# Altium schematic symbol library MY_LIB_Connectors_IEC.SchLib: 136 symbols (part 1 of 3)
Pins are listed as number, name and electrical type; pins without a type are passive.

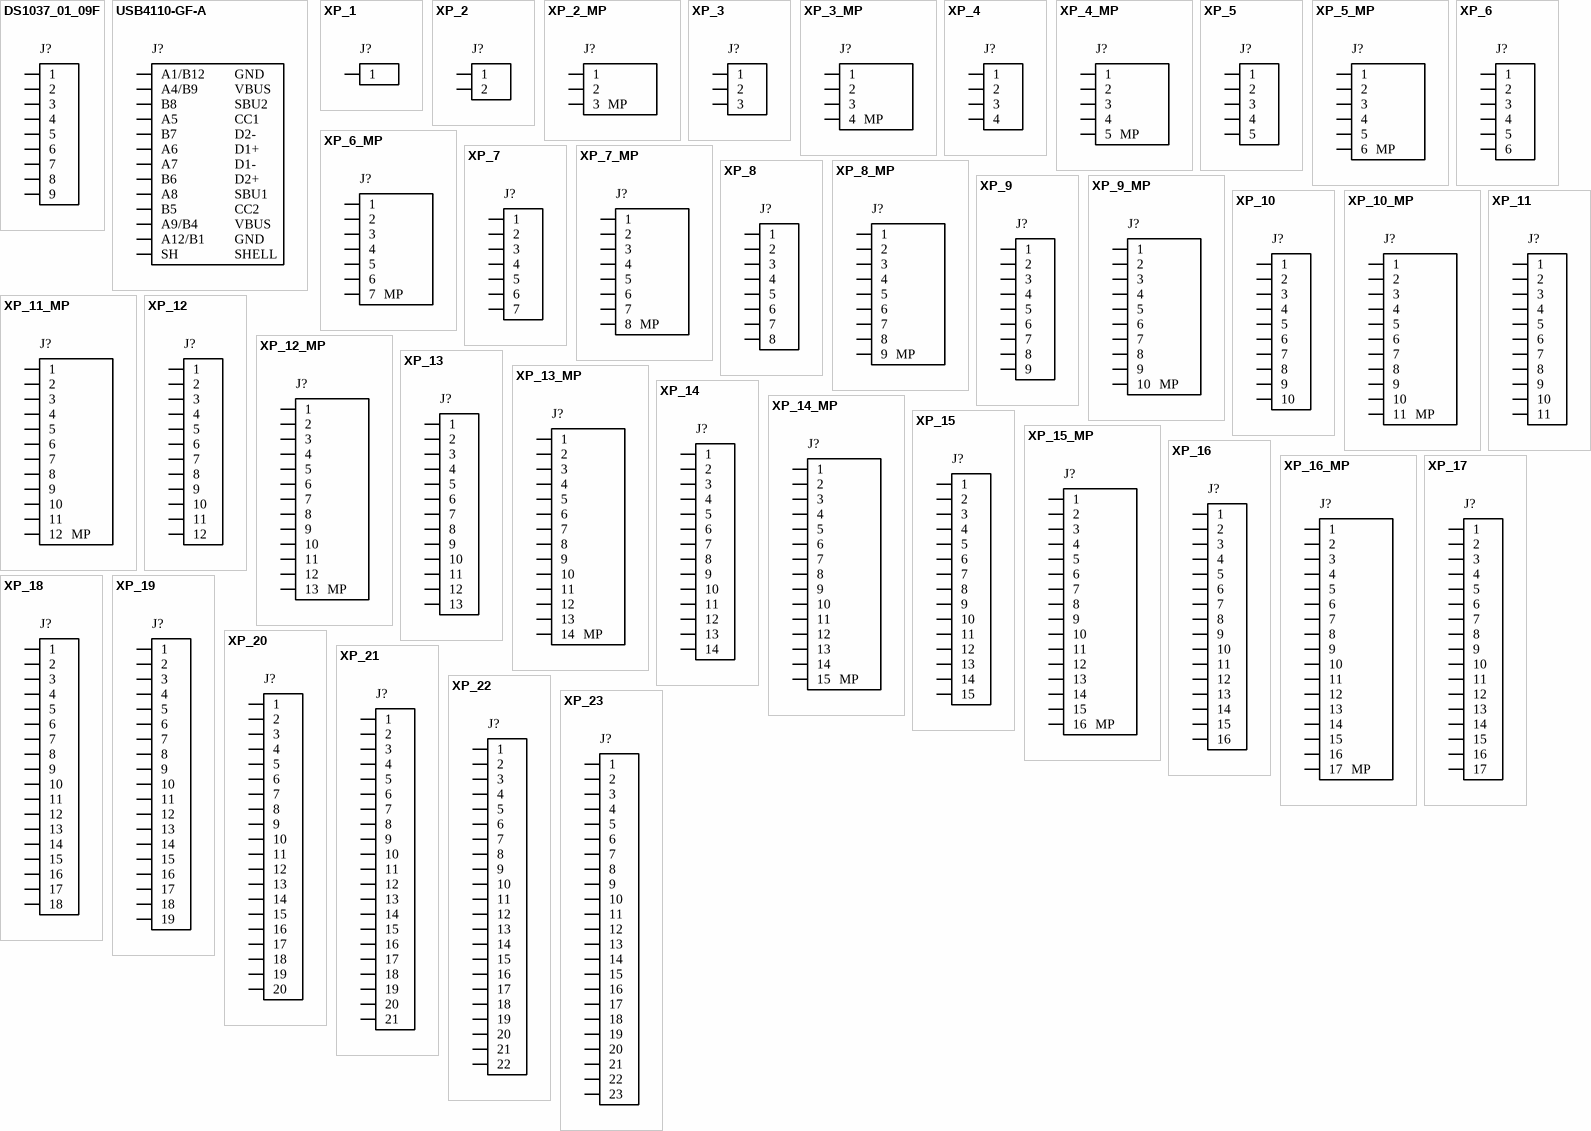
[diagram p0: symbols DS1037_01_09F to XP_23]

## DS1037_01_09F
designator J?  (value not drawn)
Generic 9-contact connector; editable signal names; Pin9_Name: Name; Value: *; Pin8_Name: Name; Pin7_Name: Name; Pin6_Name: Name; Pin5_Name: Name; Pin4_Name: Name; Pin3_Name: Name; Pin2_Name: Name; Pin1_Name: Name
pins: 1 Name, 2 Name, 3 Name, 4 Name, 5 Name, 6 Name, 7 Name, 8 Name, 9 Name

## USB4110-GF-A
designator J?  PinA1_B12_Name: GND  PinA4_B9_Name: VBUS  PinB8_Name: SBU2  PinA5_Name: CC1  PinB7_Name: D2-  PinA6_Name: D1+  PinA7_Name: D1-  PinB6_Name: D2+  PinA8_Name: SBU1  PinB5_Name: CC2  PinSH_Name: SHELL  (hidden comment: USB4110-GF-A)
GCT USB Type-C USB2.0 receptacle; 12 PCB signal terminals representing 16 mating contacts; common SH shell pin; Value: USB4110-GF-A; Manufacturer: GCT; MPN: USB4110-GF-A; Datasheet: https://gct.co/files/drawings/usb4110.pdf; PinA9_B4_Name: VBUS; PinA12_B1_Name: GND
pins: A1/B12 GND, A4/B9 VBUS, A5 CC1, A6 D+1, A7 D-1, A8 SBU1, A9/B4 VBUS, A12/B1 GND, B5 CC2, B6 D+2, B7 D-2, B8 SBU2, SH SHELL

## XP_1
designator J?  (value not drawn)
Generic 1-contact connector; editable signal names; Pin1_Name: Name; Value: *
pins: 1 Name

## XP_2
designator J?  (value not drawn)
Generic 2-contact connector; editable signal names; Pin2_Name: Name; Value: *; Pin1_Name: Name
pins: 1 Name, 2 Name

## XP_2_MP
designator J?  Pin3_Name: MP  (hidden comment: *)
2 signal contacts plus MP; plug connector; Pin2_Name: Name; Value: *; Pin1_Name: Name
pins: 1 Name, 2 Name, 3 MP

## XP_3
designator J?  (value not drawn)
Generic 3-contact connector; editable signal names; Pin3_Name: Name; Value: *; Pin2_Name: Name; Pin1_Name: Name
pins: 1 Name, 2 Name, 3 Name

## XP_3_MP
designator J?  Pin4_Name: MP  (hidden comment: *)
3 signal contacts plus MP; plug connector; Pin3_Name: Name; Value: *; Pin2_Name: Name; Pin1_Name: Name
pins: 1 Name, 2 Name, 3 Name, 4 MP

## XP_4
designator J?  (value not drawn)
Generic 4-contact connector; editable signal names; Pin4_Name: Name; Value: *; Pin3_Name: Name; Pin2_Name: Name; Pin1_Name: Name
pins: 1 Name, 2 Name, 3 Name, 4 Name

## XP_4_MP
designator J?  Pin5_Name: MP  (hidden comment: *)
4 signal contacts plus MP; plug connector; Pin4_Name: Name; Value: *; Pin3_Name: Name; Pin2_Name: Name; Pin1_Name: Name
pins: 1 Name, 2 Name, 3 Name, 4 Name, 5 MP

## XP_5
designator J?  (value not drawn)
Generic 5-contact connector; editable signal names; Pin5_Name: Name; Value: *; Pin4_Name: Name; Pin3_Name: Name; Pin2_Name: Name; Pin1_Name: Name
pins: 1 Name, 2 Name, 3 Name, 4 Name, 5 Name

## XP_5_MP
designator J?  Pin6_Name: MP  (hidden comment: *)
5 signal contacts plus MP; plug connector; Pin5_Name: Name; Value: *; Pin4_Name: Name; Pin3_Name: Name; Pin2_Name: Name; Pin1_Name: Name
pins: 1 Name, 2 Name, 3 Name, 4 Name, 5 Name, 6 MP

## XP_6
designator J?  (value not drawn)
Generic 6-contact connector; editable signal names; Pin6_Name: Name; Value: *; Pin5_Name: Name; Pin4_Name: Name; Pin3_Name: Name; Pin2_Name: Name; Pin1_Name: Name
pins: 1 Name, 2 Name, 3 Name, 4 Name, 5 Name, 6 Name

## XP_6_MP
designator J?  Pin7_Name: MP  (hidden comment: *)
6 signal contacts plus MP; plug connector; Pin6_Name: Name; Value: *; Pin5_Name: Name; Pin4_Name: Name; Pin3_Name: Name; Pin2_Name: Name; Pin1_Name: Name
pins: 1 Name, 2 Name, 3 Name, 4 Name, 5 Name, 6 Name, 7 MP

## XP_7
designator J?  (value not drawn)
Generic 7-contact connector; editable signal names; Pin7_Name: Name; Value: *; Pin6_Name: Name; Pin5_Name: Name; Pin4_Name: Name; Pin3_Name: Name; Pin2_Name: Name; Pin1_Name: Name
pins: 1 Name, 2 Name, 3 Name, 4 Name, 5 Name, 6 Name, 7 Name

## XP_7_MP
designator J?  Pin8_Name: MP  (hidden comment: *)
7 signal contacts plus MP; plug connector; Pin7_Name: Name; Value: *; Pin6_Name: Name; Pin5_Name: Name; Pin4_Name: Name; Pin3_Name: Name; Pin2_Name: Name; Pin1_Name: Name
pins: 1 Name, 2 Name, 3 Name, 4 Name, 5 Name, 6 Name, 7 Name, 8 MP

## XP_8
designator J?  (value not drawn)
Generic 8-contact connector; editable signal names; Pin8_Name: Name; Value: *; Pin7_Name: Name; Pin6_Name: Name; Pin5_Name: Name; Pin4_Name: Name; Pin3_Name: Name; Pin2_Name: Name; Pin1_Name: Name
pins: 1 Name, 2 Name, 3 Name, 4 Name, 5 Name, 6 Name, 7 Name, 8 Name

## XP_8_MP
designator J?  Pin9_Name: MP  (hidden comment: *)
8 signal contacts plus MP; plug connector; Pin8_Name: Name; Value: *; Pin7_Name: Name; Pin6_Name: Name; Pin5_Name: Name; Pin4_Name: Name; Pin3_Name: Name; Pin2_Name: Name; Pin1_Name: Name
pins: 1 Name, 2 Name, 3 Name, 4 Name, 5 Name, 6 Name, 7 Name, 8 Name, 9 MP

## XP_9
designator J?  (value not drawn)
Generic 9-contact connector; editable signal names; Pin9_Name: Name; Value: *; Pin8_Name: Name; Pin7_Name: Name; Pin6_Name: Name; Pin5_Name: Name; Pin4_Name: Name; Pin3_Name: Name; Pin2_Name: Name; Pin1_Name: Name
pins: 1 Name, 2 Name, 3 Name, 4 Name, 5 Name, 6 Name, 7 Name, 8 Name, 9 Name

## XP_9_MP
designator J?  Pin10_Name: MP  (hidden comment: *)
9 signal contacts plus MP; plug connector; Pin9_Name: Name; Value: *; Pin8_Name: Name; Pin7_Name: Name; Pin6_Name: Name; Pin5_Name: Name; Pin4_Name: Name; Pin3_Name: Name; Pin2_Name: Name; Pin1_Name: Name
pins: 1 Name, 2 Name, 3 Name, 4 Name, 5 Name, 6 Name, 7 Name, 8 Name, 9 Name, 10 MP

## XP_10
designator J?  (value not drawn)
Generic 10-contact connector; editable signal names; Pin10_Name: Name; Value: *; Pin9_Name: Name; Pin8_Name: Name; Pin7_Name: Name; Pin6_Name: Name; Pin5_Name: Name; Pin4_Name: Name; Pin3_Name: Name; Pin2_Name: Name; Pin1_Name: Name
pins: 1 Name, 2 Name, 3 Name, 4 Name, 5 Name, 6 Name, 7 Name, 8 Name, 9 Name, 10 Name

## XP_10_MP
designator J?  Pin11_Name: MP  (hidden comment: *)
10 signal contacts plus MP; plug connector; Pin10_Name: Name; Value: *; Pin9_Name: Name; Pin8_Name: Name; Pin7_Name: Name; Pin6_Name: Name; Pin5_Name: Name; Pin4_Name: Name; Pin3_Name: Name; Pin2_Name: Name; Pin1_Name: Name
pins: 1 Name, 2 Name, 3 Name, 4 Name, 5 Name, 6 Name, 7 Name, 8 Name, 9 Name, 10 Name, 11 MP

## XP_11
designator J?  (value not drawn)
Generic 11-contact connector; editable signal names; Pin11_Name: Name; Value: *; Pin10_Name: Name; Pin9_Name: Name; Pin8_Name: Name; Pin7_Name: Name; Pin6_Name: Name; Pin5_Name: Name; Pin4_Name: Name; Pin3_Name: Name; Pin2_Name: Name; Pin1_Name: Name
pins: 1 Name, 2 Name, 3 Name, 4 Name, 5 Name, 6 Name, 7 Name, 8 Name, 9 Name, 10 Name, 11 Name

## XP_11_MP
designator J?  Pin12_Name: MP  (hidden comment: *)
11 signal contacts plus MP; plug connector; Pin11_Name: Name; Value: *; Pin10_Name: Name; Pin9_Name: Name; Pin8_Name: Name; Pin7_Name: Name; Pin6_Name: Name; Pin5_Name: Name; Pin4_Name: Name; Pin3_Name: Name; Pin2_Name: Name; Pin1_Name: Name
pins: 1 Name, 2 Name, 3 Name, 4 Name, 5 Name, 6 Name, 7 Name, 8 Name, 9 Name, 10 Name, 11 Name, 12 MP

## XP_12
designator J?  (value not drawn)
Generic 12-contact connector; editable signal names; Pin12_Name: Name; Value: *; Pin11_Name: Name; Pin10_Name: Name; Pin9_Name: Name; Pin8_Name: Name; Pin7_Name: Name; Pin6_Name: Name; Pin5_Name: Name; Pin4_Name: Name; Pin3_Name: Name; Pin2_Name: Name; Pin1_Name: Name
pins: 1 Name, 2 Name, 3 Name, 4 Name, 5 Name, 6 Name, 7 Name, 8 Name, 9 Name, 10 Name, 11 Name, 12 Name

## XP_12_MP
designator J?  Pin13_Name: MP  (hidden comment: *)
12 signal contacts plus MP; plug connector; Pin12_Name: Name; Value: *; Pin11_Name: Name; Pin10_Name: Name; Pin9_Name: Name; Pin8_Name: Name; Pin7_Name: Name; Pin6_Name: Name; Pin5_Name: Name; Pin4_Name: Name; Pin3_Name: Name; Pin2_Name: Name; Pin1_Name: Name
pins: 1 Name, 2 Name, 3 Name, 4 Name, 5 Name, 6 Name, 7 Name, 8 Name, 9 Name, 10 Name, 11 Name, 12 Name, 13 MP

## XP_13
designator J?  (value not drawn)
Generic 13-contact connector; editable signal names; Pin13_Name: Name; Value: *; Pin12_Name: Name; Pin11_Name: Name; Pin10_Name: Name; Pin9_Name: Name; Pin8_Name: Name; Pin7_Name: Name; Pin6_Name: Name; Pin5_Name: Name; Pin4_Name: Name; Pin3_Name: Name; Pin2_Name: Name; Pin1_Name: Name
pins: 1 Name, 2 Name, 3 Name, 4 Name, 5 Name, 6 Name, 7 Name, 8 Name, 9 Name, 10 Name, 11 Name, 12 Name, 13 Name

## XP_13_MP
designator J?  Pin14_Name: MP  (hidden comment: *)
13 signal contacts plus MP; plug connector; Pin13_Name: Name; Value: *; Pin12_Name: Name; Pin11_Name: Name; Pin10_Name: Name; Pin9_Name: Name; Pin8_Name: Name; Pin7_Name: Name; Pin6_Name: Name; Pin5_Name: Name; Pin4_Name: Name; Pin3_Name: Name; Pin2_Name: Name; Pin1_Name: Name
pins: 1 Name, 2 Name, 3 Name, 4 Name, 5 Name, 6 Name, 7 Name, 8 Name, 9 Name, 10 Name, 11 Name, 12 Name, 13 Name, 14 MP

## XP_14
designator J?  (value not drawn)
Generic 14-contact connector; editable signal names; Pin14_Name: Name; Value: *; Pin13_Name: Name; Pin12_Name: Name; Pin11_Name: Name; Pin10_Name: Name; Pin9_Name: Name; Pin8_Name: Name; Pin7_Name: Name; Pin6_Name: Name; Pin5_Name: Name; Pin4_Name: Name; Pin3_Name: Name; Pin2_Name: Name; Pin1_Name: Name
pins: 1 Name, 2 Name, 3 Name, 4 Name, 5 Name, 6 Name, 7 Name, 8 Name, 9 Name, 10 Name, 11 Name, 12 Name, 13 Name, 14 Name

## XP_14_MP
designator J?  Pin15_Name: MP  (hidden comment: *)
14 signal contacts plus MP; plug connector; Pin14_Name: Name; Value: *; Pin13_Name: Name; Pin12_Name: Name; Pin11_Name: Name; Pin10_Name: Name; Pin9_Name: Name; Pin8_Name: Name; Pin7_Name: Name; Pin6_Name: Name; Pin5_Name: Name; Pin4_Name: Name; Pin3_Name: Name; Pin2_Name: Name; Pin1_Name: Name
pins: 1 Name, 2 Name, 3 Name, 4 Name, 5 Name, 6 Name, 7 Name, 8 Name, 9 Name, 10 Name, 11 Name, 12 Name, 13 Name, 14 Name, 15 MP

## XP_15
designator J?  (value not drawn)
Generic 15-contact connector; editable signal names; Pin15_Name: Name; Value: *; Pin14_Name: Name; Pin13_Name: Name; Pin12_Name: Name; Pin11_Name: Name; Pin10_Name: Name; Pin9_Name: Name; Pin8_Name: Name; Pin7_Name: Name; Pin6_Name: Name; Pin5_Name: Name; Pin4_Name: Name; Pin3_Name: Name; Pin2_Name: Name; Pin1_Name: Name
pins: 1 Name, 2 Name, 3 Name, 4 Name, 5 Name, 6 Name, 7 Name, 8 Name, 9 Name, 10 Name, 11 Name, 12 Name, 13 Name, 14 Name, 15 Name

## XP_15_MP
designator J?  Pin16_Name: MP  (hidden comment: *)
15 signal contacts plus MP; plug connector; Pin15_Name: Name; Value: *; Pin14_Name: Name; Pin13_Name: Name; Pin12_Name: Name; Pin11_Name: Name; Pin10_Name: Name; Pin9_Name: Name; Pin8_Name: Name; Pin7_Name: Name; Pin6_Name: Name; Pin5_Name: Name; Pin4_Name: Name; Pin3_Name: Name; Pin2_Name: Name; Pin1_Name: Name
pins: 1 Name, 2 Name, 3 Name, 4 Name, 5 Name, 6 Name, 7 Name, 8 Name, 9 Name, 10 Name, 11 Name, 12 Name, 13 Name, 14 Name, 15 Name, 16 MP

## XP_16
designator J?  (value not drawn)
Generic 16-contact connector; editable signal names; Pin16_Name: Name; Value: *; Pin15_Name: Name; Pin14_Name: Name; Pin13_Name: Name; Pin12_Name: Name; Pin11_Name: Name; Pin10_Name: Name; Pin9_Name: Name; Pin8_Name: Name; Pin7_Name: Name; Pin6_Name: Name; Pin5_Name: Name; Pin4_Name: Name; Pin3_Name: Name; Pin2_Name: Name; Pin1_Name: Name
pins: 1 Name, 2 Name, 3 Name, 4 Name, 5 Name, 6 Name, 7 Name, 8 Name, 9 Name, 10 Name, 11 Name, 12 Name, 13 Name, 14 Name, 15 Name, 16 Name

## XP_16_MP
designator J?  Pin17_Name: MP  (hidden comment: *)
16 signal contacts plus MP; plug connector; Pin16_Name: Name; Value: *; Pin15_Name: Name; Pin14_Name: Name; Pin13_Name: Name; Pin12_Name: Name; Pin11_Name: Name; Pin10_Name: Name; Pin9_Name: Name; Pin8_Name: Name; Pin7_Name: Name; Pin6_Name: Name; Pin5_Name: Name; Pin4_Name: Name; Pin3_Name: Name; Pin2_Name: Name; Pin1_Name: Name
pins: 1 Name, 2 Name, 3 Name, 4 Name, 5 Name, 6 Name, 7 Name, 8 Name, 9 Name, 10 Name, 11 Name, 12 Name, 13 Name, 14 Name, 15 Name, 16 Name, 17 MP

## XP_17
designator J?  (value not drawn)
Generic 17-contact connector; editable signal names; Pin17_Name: Name; Value: *; Pin16_Name: Name; Pin15_Name: Name; Pin14_Name: Name; Pin13_Name: Name; Pin12_Name: Name; Pin11_Name: Name; Pin10_Name: Name; Pin9_Name: Name; Pin8_Name: Name; Pin7_Name: Name; Pin6_Name: Name; Pin5_Name: Name; Pin4_Name: Name; Pin3_Name: Name; Pin2_Name: Name; Pin1_Name: Name
pins: 1 Name, 2 Name, 3 Name, 4 Name, 5 Name, 6 Name, 7 Name, 8 Name, 9 Name, 10 Name, 11 Name, 12 Name, 13 Name, 14 Name, 15 Name, 16 Name, 17 Name

## XP_18
designator J?  (value not drawn)
Generic 18-contact connector; editable signal names; Pin18_Name: Name; Value: *; Pin17_Name: Name; Pin16_Name: Name; Pin15_Name: Name; Pin14_Name: Name; Pin13_Name: Name; Pin12_Name: Name; Pin11_Name: Name; Pin10_Name: Name; Pin9_Name: Name; Pin8_Name: Name; Pin7_Name: Name; Pin6_Name: Name; Pin5_Name: Name; Pin4_Name: Name; Pin3_Name: Name; Pin2_Name: Name; Pin1_Name: Name
pins: 1 Name, 2 Name, 3 Name, 4 Name, 5 Name, 6 Name, 7 Name, 8 Name, 9 Name, 10 Name, 11 Name, 12 Name, 13 Name, 14 Name, 15 Name, 16 Name, 17 Name, 18 Name

## XP_19
designator J?  (value not drawn)
Generic 19-contact connector; editable signal names; Pin19_Name: Name; Value: *; Pin18_Name: Name; Pin17_Name: Name; Pin16_Name: Name; Pin15_Name: Name; Pin14_Name: Name; Pin13_Name: Name; Pin12_Name: Name; Pin11_Name: Name; Pin10_Name: Name; Pin9_Name: Name; Pin8_Name: Name; Pin7_Name: Name; Pin6_Name: Name; Pin5_Name: Name; Pin4_Name: Name; Pin3_Name: Name; Pin2_Name: Name; Pin1_Name: Name
pins: 1 Name, 2 Name, 3 Name, 4 Name, 5 Name, 6 Name, 7 Name, 8 Name, 9 Name, 10 Name, 11 Name, 12 Name, 13 Name, 14 Name, 15 Name, 16 Name, 17 Name, 18 Name, 19 Name

## XP_20
designator J?  (value not drawn)
Generic 20-contact connector; editable signal names; Pin20_Name: Name; Value: *; Pin19_Name: Name; Pin18_Name: Name; Pin17_Name: Name; Pin16_Name: Name; Pin15_Name: Name; Pin14_Name: Name; Pin13_Name: Name; Pin12_Name: Name; Pin11_Name: Name; Pin10_Name: Name; Pin9_Name: Name; Pin8_Name: Name; Pin7_Name: Name; Pin6_Name: Name; Pin5_Name: Name; Pin4_Name: Name; Pin3_Name: Name; Pin2_Name: Name; Pin1_Name: Name
pins: 1 Name, 2 Name, 3 Name, 4 Name, 5 Name, 6 Name, 7 Name, 8 Name, 9 Name, 10 Name, 11 Name, 12 Name, 13 Name, 14 Name, 15 Name, 16 Name, 17 Name, 18 Name, 19 Name, 20 Name

## XP_21
designator J?  (value not drawn)
Generic 21-contact connector; editable signal names; Pin21_Name: Name; Value: *; Pin20_Name: Name; Pin19_Name: Name; Pin18_Name: Name; Pin17_Name: Name; Pin16_Name: Name; Pin15_Name: Name; Pin14_Name: Name; Pin13_Name: Name; Pin12_Name: Name; Pin11_Name: Name; Pin10_Name: Name; Pin9_Name: Name; Pin8_Name: Name; Pin7_Name: Name; Pin6_Name: Name; Pin5_Name: Name; Pin4_Name: Name; Pin3_Name: Name; Pin2_Name: Name; Pin1_Name: Name
pins: 1 Name, 2 Name, 3 Name, 4 Name, 5 Name, 6 Name, 7 Name, 8 Name, 9 Name, 10 Name, 11 Name, 12 Name, 13 Name, 14 Name, 15 Name, 16 Name, 17 Name, 18 Name, 19 Name, 20 Name, 21 Name

## XP_22
designator J?  (value not drawn)
Generic 22-contact connector; editable signal names; Pin22_Name: Name; Value: *; Pin21_Name: Name; Pin20_Name: Name; Pin19_Name: Name; Pin18_Name: Name; Pin17_Name: Name; Pin16_Name: Name; Pin15_Name: Name; Pin14_Name: Name; Pin13_Name: Name; Pin12_Name: Name; Pin11_Name: Name; Pin10_Name: Name; Pin9_Name: Name; Pin8_Name: Name; Pin7_Name: Name; Pin6_Name: Name; Pin5_Name: Name; Pin4_Name: Name; Pin3_Name: Name; Pin2_Name: Name; Pin1_Name: Name
pins: 1 Name, 2 Name, 3 Name, 4 Name, 5 Name, 6 Name, 7 Name, 8 Name, 9 Name, 10 Name, 11 Name, 12 Name, 13 Name, 14 Name, 15 Name, 16 Name, 17 Name, 18 Name, 19 Name, 20 Name, 21 Name, 22 Name

## XP_23
designator J?  (value not drawn)
Generic 23-contact connector; editable signal names; Pin23_Name: Name; Value: *; Pin22_Name: Name; Pin21_Name: Name; Pin20_Name: Name; Pin19_Name: Name; Pin18_Name: Name; Pin17_Name: Name; Pin16_Name: Name; Pin15_Name: Name; Pin14_Name: Name; Pin13_Name: Name; Pin12_Name: Name; Pin11_Name: Name; Pin10_Name: Name; Pin9_Name: Name; Pin8_Name: Name; Pin7_Name: Name; Pin6_Name: Name; Pin5_Name: Name; Pin4_Name: Name; Pin3_Name: Name; Pin2_Name: Name; Pin1_Name: Name
pins: 1 Name, 2 Name, 3 Name, 4 Name, 5 Name, 6 Name, 7 Name, 8 Name, 9 Name, 10 Name, 11 Name, 12 Name, 13 Name, 14 Name, 15 Name, 16 Name, 17 Name, 18 Name, 19 Name, 20 Name, 21 Name, 22 Name, 23 Name

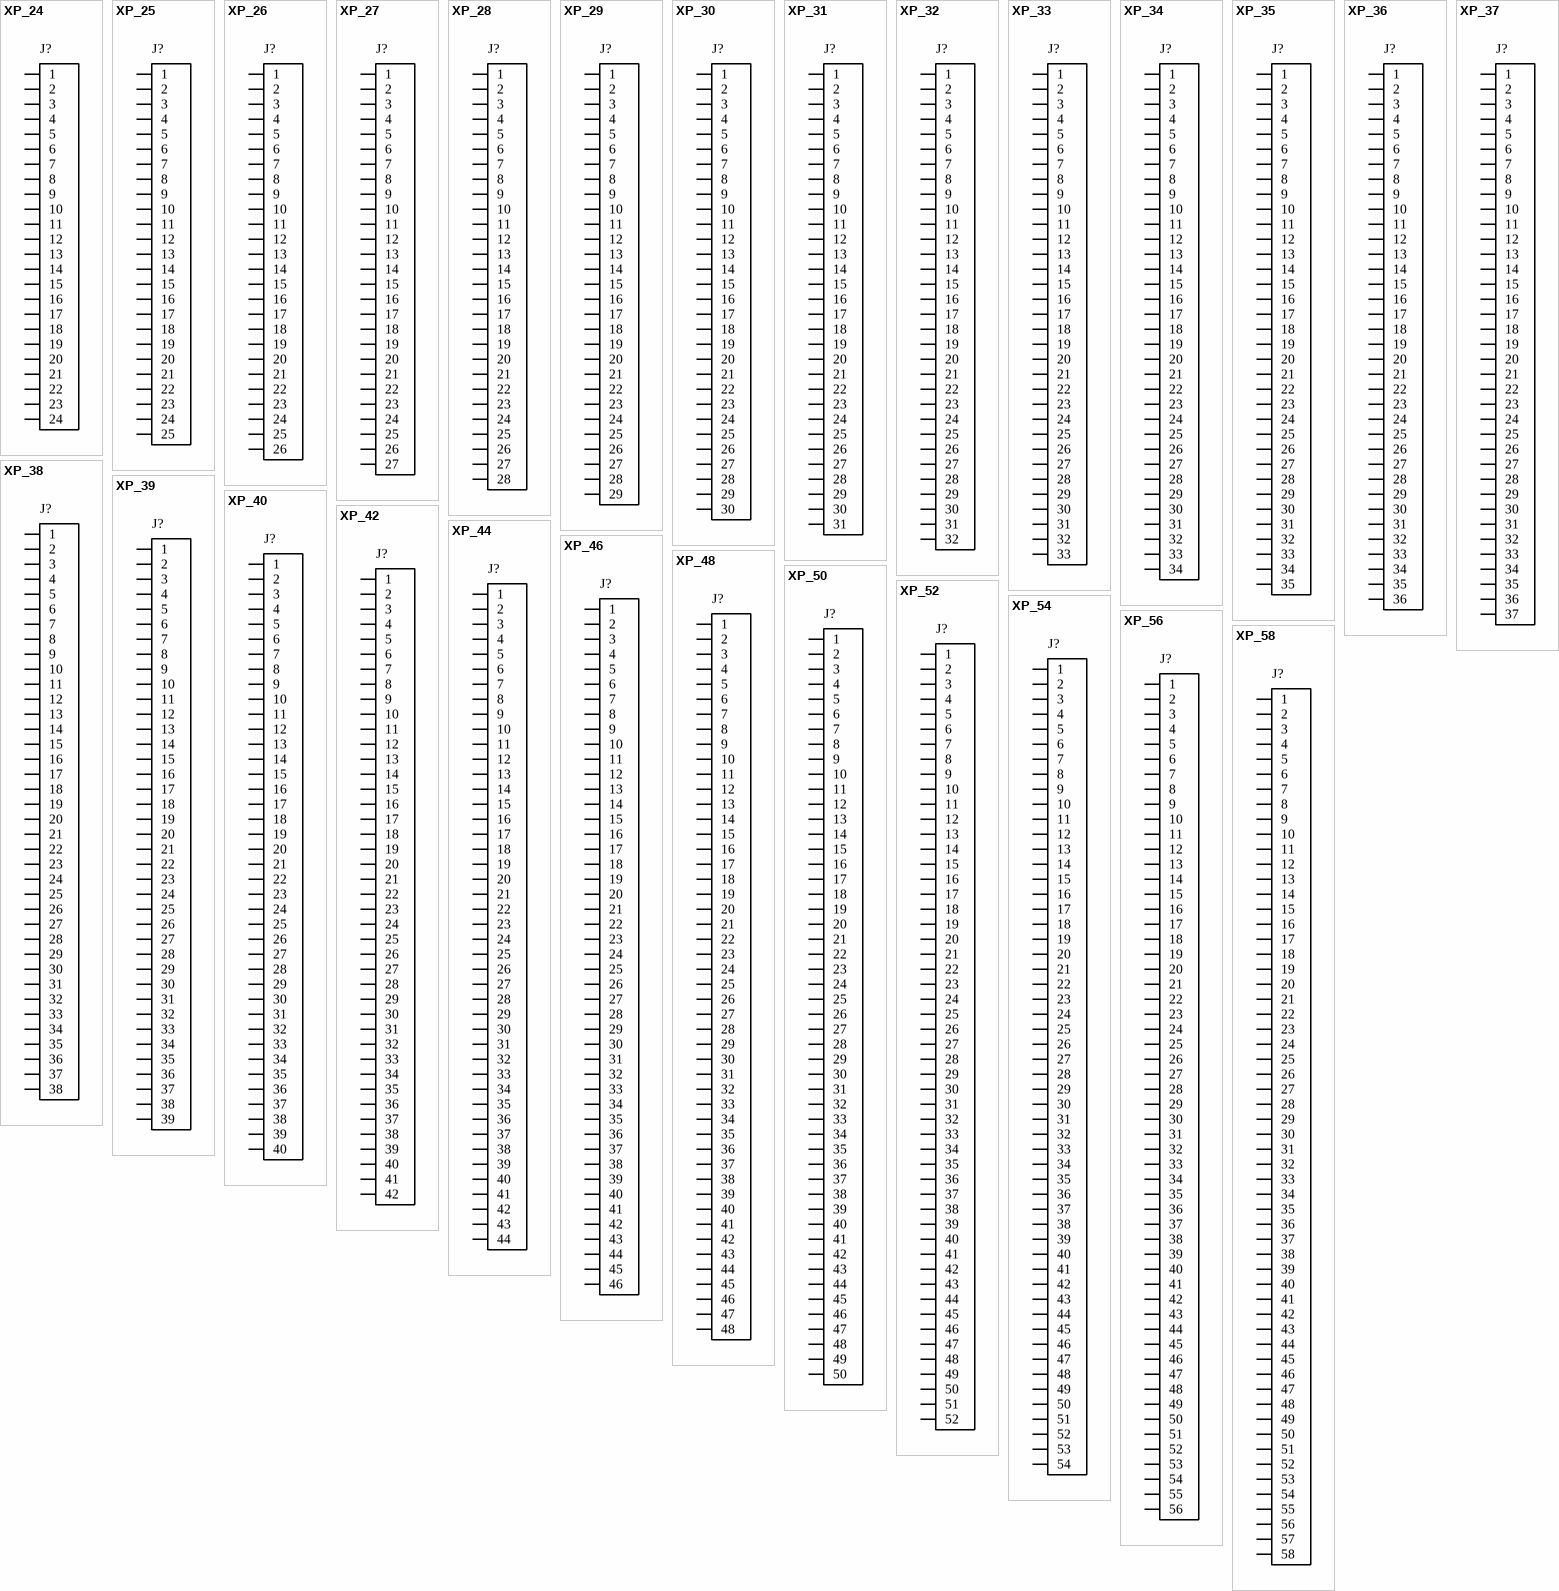
[diagram p1: symbols XP_24 to XP_58]

## XP_24
designator J?  (value not drawn)
Generic 24-contact connector; editable signal names; Pin24_Name: Name; Value: *; Pin23_Name: Name; Pin22_Name: Name; Pin21_Name: Name; Pin20_Name: Name; Pin19_Name: Name; Pin18_Name: Name; Pin17_Name: Name; Pin16_Name: Name; Pin15_Name: Name; Pin14_Name: Name; Pin13_Name: Name; Pin12_Name: Name; Pin11_Name: Name; Pin10_Name: Name; Pin9_Name: Name; Pin8_Name: Name; Pin7_Name: Name; Pin6_Name: Name; Pin5_Name: Name; Pin4_Name: Name; Pin3_Name: Name; Pin2_Name: Name; Pin1_Name: Name
pins: 1 Name, 2 Name, 3 Name, 4 Name, 5 Name, 6 Name, 7 Name, 8 Name, 9 Name, 10 Name, 11 Name, 12 Name, 13 Name, 14 Name, 15 Name, 16 Name, 17 Name, 18 Name, 19 Name, 20 Name, 21 Name, 22 Name, 23 Name, 24 Name

## XP_25
designator J?  (value not drawn)
Generic 25-contact connector; editable signal names; Pin25_Name: Name; Value: *; Pin24_Name: Name; Pin23_Name: Name; Pin22_Name: Name; Pin21_Name: Name; Pin20_Name: Name; Pin19_Name: Name; Pin18_Name: Name; Pin17_Name: Name; Pin16_Name: Name; Pin15_Name: Name; Pin14_Name: Name; Pin13_Name: Name; Pin12_Name: Name; Pin11_Name: Name; Pin10_Name: Name; Pin9_Name: Name; Pin8_Name: Name; Pin7_Name: Name; Pin6_Name: Name; Pin5_Name: Name; Pin4_Name: Name; Pin3_Name: Name; Pin2_Name: Name; Pin1_Name: Name
pins: 1 Name, 2 Name, 3 Name, 4 Name, 5 Name, 6 Name, 7 Name, 8 Name, 9 Name, 10 Name, 11 Name, 12 Name, 13 Name, 14 Name, 15 Name, 16 Name, 17 Name, 18 Name, 19 Name, 20 Name, 21 Name, 22 Name, 23 Name, 24 Name, 25 Name

## XP_26
designator J?  (value not drawn)
Generic 26-contact connector; editable signal names; Pin26_Name: Name; Value: *; Pin25_Name: Name; Pin24_Name: Name; Pin23_Name: Name; Pin22_Name: Name; Pin21_Name: Name; Pin20_Name: Name; Pin19_Name: Name; Pin18_Name: Name; Pin17_Name: Name; Pin16_Name: Name; Pin15_Name: Name; Pin14_Name: Name; Pin13_Name: Name; Pin12_Name: Name; Pin11_Name: Name; Pin10_Name: Name; Pin9_Name: Name; Pin8_Name: Name; Pin7_Name: Name; Pin6_Name: Name; Pin5_Name: Name; Pin4_Name: Name; Pin3_Name: Name; Pin2_Name: Name; Pin1_Name: Name
pins: 1 Name, 2 Name, 3 Name, 4 Name, 5 Name, 6 Name, 7 Name, 8 Name, 9 Name, 10 Name, 11 Name, 12 Name, 13 Name, 14 Name, 15 Name, 16 Name, 17 Name, 18 Name, 19 Name, 20 Name, 21 Name, 22 Name, 23 Name, 24 Name, 25 Name, 26 Name

## XP_27
designator J?  (value not drawn)
Generic 27-contact connector; editable signal names; Pin27_Name: Name; Value: *; Pin26_Name: Name; Pin25_Name: Name; Pin24_Name: Name; Pin23_Name: Name; Pin22_Name: Name; Pin21_Name: Name; Pin20_Name: Name; Pin19_Name: Name; Pin18_Name: Name; Pin17_Name: Name; Pin16_Name: Name; Pin15_Name: Name; Pin14_Name: Name; Pin13_Name: Name; Pin12_Name: Name; Pin11_Name: Name; Pin10_Name: Name; Pin9_Name: Name; Pin8_Name: Name; Pin7_Name: Name; Pin6_Name: Name; Pin5_Name: Name; Pin4_Name: Name; Pin3_Name: Name; Pin2_Name: Name; Pin1_Name: Name
pins: 1 Name, 2 Name, 3 Name, 4 Name, 5 Name, 6 Name, 7 Name, 8 Name, 9 Name, 10 Name, 11 Name, 12 Name, 13 Name, 14 Name, 15 Name, 16 Name, 17 Name, 18 Name, 19 Name, 20 Name, 21 Name, 22 Name, 23 Name, 24 Name, 25 Name, 26 Name, 27 Name

## XP_28
designator J?  (value not drawn)
Generic 28-contact connector; editable signal names; Pin28_Name: Name; Value: *; Pin27_Name: Name; Pin26_Name: Name; Pin25_Name: Name; Pin24_Name: Name; Pin23_Name: Name; Pin22_Name: Name; Pin21_Name: Name; Pin20_Name: Name; Pin19_Name: Name; Pin18_Name: Name; Pin17_Name: Name; Pin16_Name: Name; Pin15_Name: Name; Pin14_Name: Name; Pin13_Name: Name; Pin12_Name: Name; Pin11_Name: Name; Pin10_Name: Name; Pin9_Name: Name; Pin8_Name: Name; Pin7_Name: Name; Pin6_Name: Name; Pin5_Name: Name; Pin4_Name: Name; Pin3_Name: Name; Pin2_Name: Name; Pin1_Name: Name
pins: 1 Name, 2 Name, 3 Name, 4 Name, 5 Name, 6 Name, 7 Name, 8 Name, 9 Name, 10 Name, 11 Name, 12 Name, 13 Name, 14 Name, 15 Name, 16 Name, 17 Name, 18 Name, 19 Name, 20 Name, 21 Name, 22 Name, 23 Name, 24 Name, 25 Name, 26 Name, 27 Name, 28 Name

## XP_29
designator J?  (value not drawn)
Generic 29-contact connector; editable signal names; Pin29_Name: Name; Value: *; Pin28_Name: Name; Pin27_Name: Name; Pin26_Name: Name; Pin25_Name: Name; Pin24_Name: Name; Pin23_Name: Name; Pin22_Name: Name; Pin21_Name: Name; Pin20_Name: Name; Pin19_Name: Name; Pin18_Name: Name; Pin17_Name: Name; Pin16_Name: Name; Pin15_Name: Name; Pin14_Name: Name; Pin13_Name: Name; Pin12_Name: Name; Pin11_Name: Name; Pin10_Name: Name; Pin9_Name: Name; Pin8_Name: Name; Pin7_Name: Name; Pin6_Name: Name; Pin5_Name: Name; Pin4_Name: Name; Pin3_Name: Name; Pin2_Name: Name; Pin1_Name: Name
pins: 1 Name, 2 Name, 3 Name, 4 Name, 5 Name, 6 Name, 7 Name, 8 Name, 9 Name, 10 Name, 11 Name, 12 Name, 13 Name, 14 Name, 15 Name, 16 Name, 17 Name, 18 Name, 19 Name, 20 Name, 21 Name, 22 Name, 23 Name, 24 Name, 25 Name, 26 Name, 27 Name, 28 Name, 29 Name

## XP_30
designator J?  (value not drawn)
Generic 30-contact connector; editable signal names; Pin30_Name: Name; Value: *; Pin29_Name: Name; Pin28_Name: Name; Pin27_Name: Name; Pin26_Name: Name; Pin25_Name: Name; Pin24_Name: Name; Pin23_Name: Name; Pin22_Name: Name; Pin21_Name: Name; Pin20_Name: Name; Pin19_Name: Name; Pin18_Name: Name; Pin17_Name: Name; Pin16_Name: Name; Pin15_Name: Name; Pin14_Name: Name; Pin13_Name: Name; Pin12_Name: Name; Pin11_Name: Name; Pin10_Name: Name; Pin9_Name: Name; Pin8_Name: Name; Pin7_Name: Name; Pin6_Name: Name; Pin5_Name: Name; Pin4_Name: Name; Pin3_Name: Name; Pin2_Name: Name; Pin1_Name: Name
pins: 1 Name, 2 Name, 3 Name, 4 Name, 5 Name, 6 Name, 7 Name, 8 Name, 9 Name, 10 Name, 11 Name, 12 Name, 13 Name, 14 Name, 15 Name, 16 Name, 17 Name, 18 Name, 19 Name, 20 Name, 21 Name, 22 Name, 23 Name, 24 Name, 25 Name, 26 Name, 27 Name, 28 Name, 29 Name, 30 Name

## XP_31
designator J?  (value not drawn)
Generic 31-contact connector; editable signal names; Pin31_Name: Name; Value: *; Pin30_Name: Name; Pin29_Name: Name; Pin28_Name: Name; Pin27_Name: Name; Pin26_Name: Name; Pin25_Name: Name; Pin24_Name: Name; Pin23_Name: Name; Pin22_Name: Name; Pin21_Name: Name; Pin20_Name: Name; Pin19_Name: Name; Pin18_Name: Name; Pin17_Name: Name; Pin16_Name: Name; Pin15_Name: Name; Pin14_Name: Name; Pin13_Name: Name; Pin12_Name: Name; Pin11_Name: Name; Pin10_Name: Name; Pin9_Name: Name; Pin8_Name: Name; Pin7_Name: Name; Pin6_Name: Name; Pin5_Name: Name; Pin4_Name: Name; Pin3_Name: Name; Pin2_Name: Name; Pin1_Name: Name
pins: 1 Name, 2 Name, 3 Name, 4 Name, 5 Name, 6 Name, 7 Name, 8 Name, 9 Name, 10 Name, 11 Name, 12 Name, 13 Name, 14 Name, 15 Name, 16 Name, 17 Name, 18 Name, 19 Name, 20 Name, 21 Name, 22 Name, 23 Name, 24 Name, 25 Name, 26 Name, 27 Name, 28 Name, 29 Name, 30 Name, 31 Name

## XP_32
designator J?  (value not drawn)
Generic 32-contact connector; editable signal names; Pin32_Name: Name; Value: *; Pin31_Name: Name; Pin30_Name: Name; Pin29_Name: Name; Pin28_Name: Name; Pin27_Name: Name; Pin26_Name: Name; Pin25_Name: Name; Pin24_Name: Name; Pin23_Name: Name; Pin22_Name: Name; Pin21_Name: Name; Pin20_Name: Name; Pin19_Name: Name; Pin18_Name: Name; Pin17_Name: Name; Pin16_Name: Name; Pin15_Name: Name; Pin14_Name: Name; Pin13_Name: Name; Pin12_Name: Name; Pin11_Name: Name; Pin10_Name: Name; Pin9_Name: Name; Pin8_Name: Name; Pin7_Name: Name; Pin6_Name: Name; Pin5_Name: Name; Pin4_Name: Name; Pin3_Name: Name; Pin2_Name: Name; Pin1_Name: Name
pins: 1 Name, 2 Name, 3 Name, 4 Name, 5 Name, 6 Name, 7 Name, 8 Name, 9 Name, 10 Name, 11 Name, 12 Name, 13 Name, 14 Name, 15 Name, 16 Name, 17 Name, 18 Name, 19 Name, 20 Name, 21 Name, 22 Name, 23 Name, 24 Name, 25 Name, 26 Name, 27 Name, 28 Name, 29 Name, 30 Name, 31 Name, 32 Name

## XP_33
designator J?  (value not drawn)
Generic 33-contact connector; editable signal names; Pin33_Name: Name; Value: *; Pin32_Name: Name; Pin31_Name: Name; Pin30_Name: Name; Pin29_Name: Name; Pin28_Name: Name; Pin27_Name: Name; Pin26_Name: Name; Pin25_Name: Name; Pin24_Name: Name; Pin23_Name: Name; Pin22_Name: Name; Pin21_Name: Name; Pin20_Name: Name; Pin19_Name: Name; Pin18_Name: Name; Pin17_Name: Name; Pin16_Name: Name; Pin15_Name: Name; Pin14_Name: Name; Pin13_Name: Name; Pin12_Name: Name; Pin11_Name: Name; Pin10_Name: Name; Pin9_Name: Name; Pin8_Name: Name; Pin7_Name: Name; Pin6_Name: Name; Pin5_Name: Name; Pin4_Name: Name; Pin3_Name: Name; Pin2_Name: Name; Pin1_Name: Name
pins: 1 Name, 2 Name, 3 Name, 4 Name, 5 Name, 6 Name, 7 Name, 8 Name, 9 Name, 10 Name, 11 Name, 12 Name, 13 Name, 14 Name, 15 Name, 16 Name, 17 Name, 18 Name, 19 Name, 20 Name, 21 Name, 22 Name, 23 Name, 24 Name, 25 Name, 26 Name, 27 Name, 28 Name, 29 Name, 30 Name, 31 Name, 32 Name, 33 Name

## XP_34
designator J?  (value not drawn)
Generic 34-contact connector; editable signal names; Pin34_Name: Name; Value: *; Pin33_Name: Name; Pin32_Name: Name; Pin31_Name: Name; Pin30_Name: Name; Pin29_Name: Name; Pin28_Name: Name; Pin27_Name: Name; Pin26_Name: Name; Pin25_Name: Name; Pin24_Name: Name; Pin23_Name: Name; Pin22_Name: Name; Pin21_Name: Name; Pin20_Name: Name; Pin19_Name: Name; Pin18_Name: Name; Pin17_Name: Name; Pin16_Name: Name; Pin15_Name: Name; Pin14_Name: Name; Pin13_Name: Name; Pin12_Name: Name; Pin11_Name: Name; Pin10_Name: Name; Pin9_Name: Name; Pin8_Name: Name; Pin7_Name: Name; Pin6_Name: Name; Pin5_Name: Name; Pin4_Name: Name; Pin3_Name: Name; Pin2_Name: Name; Pin1_Name: Name
pins: 1 Name, 2 Name, 3 Name, 4 Name, 5 Name, 6 Name, 7 Name, 8 Name, 9 Name, 10 Name, 11 Name, 12 Name, 13 Name, 14 Name, 15 Name, 16 Name, 17 Name, 18 Name, 19 Name, 20 Name, 21 Name, 22 Name, 23 Name, 24 Name, 25 Name, 26 Name, 27 Name, 28 Name, 29 Name, 30 Name, 31 Name, 32 Name, 33 Name, 34 Name

## XP_35
designator J?  (value not drawn)
Generic 35-contact connector; editable signal names; Pin35_Name: Name; Value: *; Pin34_Name: Name; Pin33_Name: Name; Pin32_Name: Name; Pin31_Name: Name; Pin30_Name: Name; Pin29_Name: Name; Pin28_Name: Name; Pin27_Name: Name; Pin26_Name: Name; Pin25_Name: Name; Pin24_Name: Name; Pin23_Name: Name; Pin22_Name: Name; Pin21_Name: Name; Pin20_Name: Name; Pin19_Name: Name; Pin18_Name: Name; Pin17_Name: Name; Pin16_Name: Name; Pin15_Name: Name; Pin14_Name: Name; Pin13_Name: Name; Pin12_Name: Name; Pin11_Name: Name; Pin10_Name: Name; Pin9_Name: Name; Pin8_Name: Name; Pin7_Name: Name; Pin6_Name: Name; Pin5_Name: Name; Pin4_Name: Name; Pin3_Name: Name; Pin2_Name: Name; Pin1_Name: Name
pins: 1 Name, 2 Name, 3 Name, 4 Name, 5 Name, 6 Name, 7 Name, 8 Name, 9 Name, 10 Name, 11 Name, 12 Name, 13 Name, 14 Name, 15 Name, 16 Name, 17 Name, 18 Name, 19 Name, 20 Name, 21 Name, 22 Name, 23 Name, 24 Name, 25 Name, 26 Name, 27 Name, 28 Name, 29 Name, 30 Name, 31 Name, 32 Name, 33 Name, 34 Name, 35 Name

## XP_36
designator J?  (value not drawn)
Generic 36-contact connector; editable signal names; Pin36_Name: Name; Value: *; Pin35_Name: Name; Pin34_Name: Name; Pin33_Name: Name; Pin32_Name: Name; Pin31_Name: Name; Pin30_Name: Name; Pin29_Name: Name; Pin28_Name: Name; Pin27_Name: Name; Pin26_Name: Name; Pin25_Name: Name; Pin24_Name: Name; Pin23_Name: Name; Pin22_Name: Name; Pin21_Name: Name; Pin20_Name: Name; Pin19_Name: Name; Pin18_Name: Name; Pin17_Name: Name; Pin16_Name: Name; Pin15_Name: Name; Pin14_Name: Name; Pin13_Name: Name; Pin12_Name: Name; Pin11_Name: Name; Pin10_Name: Name; Pin9_Name: Name; Pin8_Name: Name; Pin7_Name: Name; Pin6_Name: Name; Pin5_Name: Name; Pin4_Name: Name; Pin3_Name: Name; Pin2_Name: Name; Pin1_Name: Name
pins: 1 Name, 2 Name, 3 Name, 4 Name, 5 Name, 6 Name, 7 Name, 8 Name, 9 Name, 10 Name, 11 Name, 12 Name, 13 Name, 14 Name, 15 Name, 16 Name, 17 Name, 18 Name, 19 Name, 20 Name, 21 Name, 22 Name, 23 Name, 24 Name, 25 Name, 26 Name, 27 Name, 28 Name, 29 Name, 30 Name, 31 Name, 32 Name, 33 Name, 34 Name, 35 Name, 36 Name

## XP_37
designator J?  (value not drawn)
Generic 37-contact connector; editable signal names; Pin37_Name: Name; Value: *; Pin36_Name: Name; Pin35_Name: Name; Pin34_Name: Name; Pin33_Name: Name; Pin32_Name: Name; Pin31_Name: Name; Pin30_Name: Name; Pin29_Name: Name; Pin28_Name: Name; Pin27_Name: Name; Pin26_Name: Name; Pin25_Name: Name; Pin24_Name: Name; Pin23_Name: Name; Pin22_Name: Name; Pin21_Name: Name; Pin20_Name: Name; Pin19_Name: Name; Pin18_Name: Name; Pin17_Name: Name; Pin16_Name: Name; Pin15_Name: Name; Pin14_Name: Name; Pin13_Name: Name; Pin12_Name: Name; Pin11_Name: Name; Pin10_Name: Name; Pin9_Name: Name; Pin8_Name: Name; Pin7_Name: Name; Pin6_Name: Name; Pin5_Name: Name; Pin4_Name: Name; Pin3_Name: Name; Pin2_Name: Name; Pin1_Name: Name
pins: 1 Name, 2 Name, 3 Name, 4 Name, 5 Name, 6 Name, 7 Name, 8 Name, 9 Name, 10 Name, 11 Name, 12 Name, 13 Name, 14 Name, 15 Name, 16 Name, 17 Name, 18 Name, 19 Name, 20 Name, 21 Name, 22 Name, 23 Name, 24 Name, 25 Name, 26 Name, 27 Name, 28 Name, 29 Name, 30 Name, 31 Name, 32 Name, 33 Name, 34 Name, 35 Name, 36 Name, 37 Name

## XP_38
designator J?  (value not drawn)
Generic 38-contact connector; editable signal names; Pin38_Name: Name; Value: *; Pin37_Name: Name; Pin36_Name: Name; Pin35_Name: Name; Pin34_Name: Name; Pin33_Name: Name; Pin32_Name: Name; Pin31_Name: Name; Pin30_Name: Name; Pin29_Name: Name; Pin28_Name: Name; Pin27_Name: Name; Pin26_Name: Name; Pin25_Name: Name; Pin24_Name: Name; Pin23_Name: Name; Pin22_Name: Name; Pin21_Name: Name; Pin20_Name: Name; Pin19_Name: Name; Pin18_Name: Name; Pin17_Name: Name; Pin16_Name: Name; Pin15_Name: Name; Pin14_Name: Name; Pin13_Name: Name; Pin12_Name: Name; Pin11_Name: Name; Pin10_Name: Name; Pin9_Name: Name; Pin8_Name: Name; Pin7_Name: Name; Pin6_Name: Name; Pin5_Name: Name; Pin4_Name: Name; Pin3_Name: Name; Pin2_Name: Name; Pin1_Name: Name
pins: 1 Name, 2 Name, 3 Name, 4 Name, 5 Name, 6 Name, 7 Name, 8 Name, 9 Name, 10 Name, 11 Name, 12 Name, 13 Name, 14 Name, 15 Name, 16 Name, 17 Name, 18 Name, 19 Name, 20 Name, 21 Name, 22 Name, 23 Name, 24 Name, 25 Name, 26 Name, 27 Name, 28 Name, 29 Name, 30 Name, 31 Name, 32 Name, 33 Name, 34 Name, 35 Name, 36 Name, 37 Name, 38 Name

## XP_39
designator J?  (value not drawn)
Generic 39-contact connector; editable signal names; Pin39_Name: Name; Value: *; Pin38_Name: Name; Pin37_Name: Name; Pin36_Name: Name; Pin35_Name: Name; Pin34_Name: Name; Pin33_Name: Name; Pin32_Name: Name; Pin31_Name: Name; Pin30_Name: Name; Pin29_Name: Name; Pin28_Name: Name; Pin27_Name: Name; Pin26_Name: Name; Pin25_Name: Name; Pin24_Name: Name; Pin23_Name: Name; Pin22_Name: Name; Pin21_Name: Name; Pin20_Name: Name; Pin19_Name: Name; Pin18_Name: Name; Pin17_Name: Name; Pin16_Name: Name; Pin15_Name: Name; Pin14_Name: Name; Pin13_Name: Name; Pin12_Name: Name; Pin11_Name: Name; Pin10_Name: Name; Pin9_Name: Name; Pin8_Name: Name; Pin7_Name: Name; Pin6_Name: Name; Pin5_Name: Name; Pin4_Name: Name; Pin3_Name: Name; Pin2_Name: Name; Pin1_Name: Name
pins: 1 Name, 2 Name, 3 Name, 4 Name, 5 Name, 6 Name, 7 Name, 8 Name, 9 Name, 10 Name, 11 Name, 12 Name, 13 Name, 14 Name, 15 Name, 16 Name, 17 Name, 18 Name, 19 Name, 20 Name, 21 Name, 22 Name, 23 Name, 24 Name, 25 Name, 26 Name, 27 Name, 28 Name, 29 Name, 30 Name, 31 Name, 32 Name, 33 Name, 34 Name, 35 Name, 36 Name, 37 Name, 38 Name, 39 Name

## XP_40
designator J?  (value not drawn)
Generic 40-contact connector; editable signal names; Pin40_Name: Name; Value: *; Pin39_Name: Name; Pin38_Name: Name; Pin37_Name: Name; Pin36_Name: Name; Pin35_Name: Name; Pin34_Name: Name; Pin33_Name: Name; Pin32_Name: Name; Pin31_Name: Name; Pin30_Name: Name; Pin29_Name: Name; Pin28_Name: Name; Pin27_Name: Name; Pin26_Name: Name; Pin25_Name: Name; Pin24_Name: Name; Pin23_Name: Name; Pin22_Name: Name; Pin21_Name: Name; Pin20_Name: Name; Pin19_Name: Name; Pin18_Name: Name; Pin17_Name: Name; Pin16_Name: Name; Pin15_Name: Name; Pin14_Name: Name; Pin13_Name: Name; Pin12_Name: Name; Pin11_Name: Name; Pin10_Name: Name; Pin9_Name: Name; Pin8_Name: Name; Pin7_Name: Name; Pin6_Name: Name; Pin5_Name: Name; Pin4_Name: Name; Pin3_Name: Name; Pin2_Name: Name; Pin1_Name: Name
pins: 1 Name, 2 Name, 3 Name, 4 Name, 5 Name, 6 Name, 7 Name, 8 Name, 9 Name, 10 Name, 11 Name, 12 Name, 13 Name, 14 Name, 15 Name, 16 Name, 17 Name, 18 Name, 19 Name, 20 Name, 21 Name, 22 Name, 23 Name, 24 Name, 25 Name, 26 Name, 27 Name, 28 Name, 29 Name, 30 Name, 31 Name, 32 Name, 33 Name, 34 Name, 35 Name, 36 Name, 37 Name, 38 Name, 39 Name, 40 Name

## XP_42
designator J?  (value not drawn)
Generic 42-contact connector; editable signal names; Pin42_Name: Name; Value: *; Pin41_Name: Name; Pin40_Name: Name; Pin39_Name: Name; Pin38_Name: Name; Pin37_Name: Name; Pin36_Name: Name; Pin35_Name: Name; Pin34_Name: Name; Pin33_Name: Name; Pin32_Name: Name; Pin31_Name: Name; Pin30_Name: Name; Pin29_Name: Name; Pin28_Name: Name; Pin27_Name: Name; Pin26_Name: Name; Pin25_Name: Name; Pin24_Name: Name; Pin23_Name: Name; Pin22_Name: Name; Pin21_Name: Name; Pin20_Name: Name; Pin19_Name: Name; Pin18_Name: Name; Pin17_Name: Name; Pin16_Name: Name; Pin15_Name: Name; Pin14_Name: Name; Pin13_Name: Name; Pin12_Name: Name; Pin11_Name: Name; Pin10_Name: Name; Pin9_Name: Name; Pin8_Name: Name; Pin7_Name: Name; Pin6_Name: Name; Pin5_Name: Name; Pin4_Name: Name; Pin3_Name: Name; Pin2_Name: Name; Pin1_Name: Name
pins: 1 Name, 2 Name, 3 Name, 4 Name, 5 Name, 6 Name, 7 Name, 8 Name, 9 Name, 10 Name, 11 Name, 12 Name, 13 Name, 14 Name, 15 Name, 16 Name, 17 Name, 18 Name, 19 Name, 20 Name, 21 Name, 22 Name, 23 Name, 24 Name, 25 Name, 26 Name, 27 Name, 28 Name, 29 Name, 30 Name, 31 Name, 32 Name, 33 Name, 34 Name, 35 Name, 36 Name, 37 Name, 38 Name, 39 Name, 40 Name, 41 Name, 42 Name

## XP_44
designator J?  (value not drawn)
Generic 44-contact connector; editable signal names; Pin44_Name: Name; Value: *; Pin43_Name: Name; Pin42_Name: Name; Pin41_Name: Name; Pin40_Name: Name; Pin39_Name: Name; Pin38_Name: Name; Pin37_Name: Name; Pin36_Name: Name; Pin35_Name: Name; Pin34_Name: Name; Pin33_Name: Name; Pin32_Name: Name; Pin31_Name: Name; Pin30_Name: Name; Pin29_Name: Name; Pin28_Name: Name; Pin27_Name: Name; Pin26_Name: Name; Pin25_Name: Name; Pin24_Name: Name; Pin23_Name: Name; Pin22_Name: Name; Pin21_Name: Name; Pin20_Name: Name; Pin19_Name: Name; Pin18_Name: Name; Pin17_Name: Name; Pin16_Name: Name; Pin15_Name: Name; Pin14_Name: Name; Pin13_Name: Name; Pin12_Name: Name; Pin11_Name: Name; Pin10_Name: Name; Pin9_Name: Name; Pin8_Name: Name; Pin7_Name: Name; Pin6_Name: Name; Pin5_Name: Name; Pin4_Name: Name; Pin3_Name: Name; Pin2_Name: Name; Pin1_Name: Name
pins: 1 Name, 2 Name, 3 Name, 4 Name, 5 Name, 6 Name, 7 Name, 8 Name, 9 Name, 10 Name, 11 Name, 12 Name, 13 Name, 14 Name, 15 Name, 16 Name, 17 Name, 18 Name, 19 Name, 20 Name, 21 Name, 22 Name, 23 Name, 24 Name, 25 Name, 26 Name, 27 Name, 28 Name, 29 Name, 30 Name, 31 Name, 32 Name, 33 Name, 34 Name, 35 Name, 36 Name, 37 Name, 38 Name, 39 Name, 40 Name, 41 Name, 42 Name, 43 Name, 44 Name

## XP_46
designator J?  (value not drawn)
Generic 46-contact connector; editable signal names; Pin46_Name: Name; Value: *; Pin45_Name: Name; Pin44_Name: Name; Pin43_Name: Name; Pin42_Name: Name; Pin41_Name: Name; Pin40_Name: Name; Pin39_Name: Name; Pin38_Name: Name; Pin37_Name: Name; Pin36_Name: Name; Pin35_Name: Name; Pin34_Name: Name; Pin33_Name: Name; Pin32_Name: Name; Pin31_Name: Name; Pin30_Name: Name; Pin29_Name: Name; Pin28_Name: Name; Pin27_Name: Name; Pin26_Name: Name; Pin25_Name: Name; Pin24_Name: Name; Pin23_Name: Name; Pin22_Name: Name; Pin21_Name: Name; Pin20_Name: Name; Pin19_Name: Name; Pin18_Name: Name; Pin17_Name: Name; Pin16_Name: Name; Pin15_Name: Name; Pin14_Name: Name; Pin13_Name: Name; Pin12_Name: Name; Pin11_Name: Name; Pin10_Name: Name; Pin9_Name: Name; Pin8_Name: Name; Pin7_Name: Name; Pin6_Name: Name; Pin5_Name: Name; Pin4_Name: Name; Pin3_Name: Name; Pin2_Name: Name; Pin1_Name: Name
pins: 1 Name, 2 Name, 3 Name, 4 Name, 5 Name, 6 Name, 7 Name, 8 Name, 9 Name, 10 Name, 11 Name, 12 Name, 13 Name, 14 Name, 15 Name, 16 Name, 17 Name, 18 Name, 19 Name, 20 Name, 21 Name, 22 Name, 23 Name, 24 Name, 25 Name, 26 Name, 27 Name, 28 Name, 29 Name, 30 Name, 31 Name, 32 Name, 33 Name, 34 Name, 35 Name, 36 Name, 37 Name, 38 Name, 39 Name, 40 Name, 41 Name, 42 Name, 43 Name, 44 Name, 45 Name, 46 Name

## XP_48
designator J?  (value not drawn)
Generic 48-contact connector; editable signal names; Pin48_Name: Name; Value: *; Pin47_Name: Name; Pin46_Name: Name; Pin45_Name: Name; Pin44_Name: Name; Pin43_Name: Name; Pin42_Name: Name; Pin41_Name: Name; Pin40_Name: Name; Pin39_Name: Name; Pin38_Name: Name; Pin37_Name: Name; Pin36_Name: Name; Pin35_Name: Name; Pin34_Name: Name; Pin33_Name: Name; Pin32_Name: Name; Pin31_Name: Name; Pin30_Name: Name; Pin29_Name: Name; Pin28_Name: Name; Pin27_Name: Name; Pin26_Name: Name; Pin25_Name: Name; Pin24_Name: Name; Pin23_Name: Name; Pin22_Name: Name; Pin21_Name: Name; Pin20_Name: Name; Pin19_Name: Name; Pin18_Name: Name; Pin17_Name: Name; Pin16_Name: Name; Pin15_Name: Name; Pin14_Name: Name; Pin13_Name: Name; Pin12_Name: Name; Pin11_Name: Name; Pin10_Name: Name; Pin9_Name: Name; Pin8_Name: Name; Pin7_Name: Name; Pin6_Name: Name; Pin5_Name: Name; Pin4_Name: Name; Pin3_Name: Name; Pin2_Name: Name; Pin1_Name: Name
pins: 1 Name, 2 Name, 3 Name, 4 Name, 5 Name, 6 Name, 7 Name, 8 Name, 9 Name, 10 Name, 11 Name, 12 Name, 13 Name, 14 Name, 15 Name, 16 Name, 17 Name, 18 Name, 19 Name, 20 Name, 21 Name, 22 Name, 23 Name, 24 Name, 25 Name, 26 Name, 27 Name, 28 Name, 29 Name, 30 Name, 31 Name, 32 Name, 33 Name, 34 Name, 35 Name, 36 Name, 37 Name, 38 Name, 39 Name, 40 Name, 41 Name, 42 Name, 43 Name, 44 Name, 45 Name, 46 Name, 47 Name, 48 Name

## XP_50
designator J?  (value not drawn)
Generic 50-contact connector; editable signal names; Pin50_Name: Name; Value: *; Pin49_Name: Name; Pin48_Name: Name; Pin47_Name: Name; Pin46_Name: Name; Pin45_Name: Name; Pin44_Name: Name; Pin43_Name: Name; Pin42_Name: Name; Pin41_Name: Name; Pin40_Name: Name; Pin39_Name: Name; Pin38_Name: Name; Pin37_Name: Name; Pin36_Name: Name; Pin35_Name: Name; Pin34_Name: Name; Pin33_Name: Name; Pin32_Name: Name; Pin31_Name: Name; Pin30_Name: Name; Pin29_Name: Name; Pin28_Name: Name; Pin27_Name: Name; Pin26_Name: Name; Pin25_Name: Name; Pin24_Name: Name; Pin23_Name: Name; Pin22_Name: Name; Pin21_Name: Name; Pin20_Name: Name; Pin19_Name: Name; Pin18_Name: Name; Pin17_Name: Name; Pin16_Name: Name; Pin15_Name: Name; Pin14_Name: Name; Pin13_Name: Name; Pin12_Name: Name; Pin11_Name: Name; Pin10_Name: Name; Pin9_Name: Name; Pin8_Name: Name; Pin7_Name: Name; Pin6_Name: Name; Pin5_Name: Name; Pin4_Name: Name; Pin3_Name: Name; Pin2_Name: Name; Pin1_Name: Name
pins: 1 Name, 2 Name, 3 Name, 4 Name, 5 Name, 6 Name, 7 Name, 8 Name, 9 Name, 10 Name, 11 Name, 12 Name, 13 Name, 14 Name, 15 Name, 16 Name, 17 Name, 18 Name, 19 Name, 20 Name, 21 Name, 22 Name, 23 Name, 24 Name, 25 Name, 26 Name, 27 Name, 28 Name, 29 Name, 30 Name, 31 Name, 32 Name, 33 Name, 34 Name, 35 Name, 36 Name, 37 Name, 38 Name, 39 Name, 40 Name, 41 Name, 42 Name, 43 Name, 44 Name, 45 Name, 46 Name, 47 Name, 48 Name, 49 Name, 50 Name

## XP_52
designator J?  (value not drawn)
Generic 52-contact connector; editable signal names; Pin52_Name: Name; Value: *; Pin51_Name: Name; Pin50_Name: Name; Pin49_Name: Name; Pin48_Name: Name; Pin47_Name: Name; Pin46_Name: Name; Pin45_Name: Name; Pin44_Name: Name; Pin43_Name: Name; Pin42_Name: Name; Pin41_Name: Name; Pin40_Name: Name; Pin39_Name: Name; Pin38_Name: Name; Pin37_Name: Name; Pin36_Name: Name; Pin35_Name: Name; Pin34_Name: Name; Pin33_Name: Name; Pin32_Name: Name; Pin31_Name: Name; Pin30_Name: Name; Pin29_Name: Name; Pin28_Name: Name; Pin27_Name: Name; Pin26_Name: Name; Pin25_Name: Name; Pin24_Name: Name; Pin23_Name: Name; Pin22_Name: Name; Pin21_Name: Name; Pin20_Name: Name; Pin19_Name: Name; Pin18_Name: Name; Pin17_Name: Name; Pin16_Name: Name; Pin15_Name: Name; Pin14_Name: Name; Pin13_Name: Name; Pin12_Name: Name; Pin11_Name: Name; Pin10_Name: Name; Pin9_Name: Name; Pin8_Name: Name; Pin7_Name: Name; Pin6_Name: Name; Pin5_Name: Name; Pin4_Name: Name; Pin3_Name: Name; Pin2_Name: Name; Pin1_Name: Name
pins: 1 Name, 2 Name, 3 Name, 4 Name, 5 Name, 6 Name, 7 Name, 8 Name, 9 Name, 10 Name, 11 Name, 12 Name, 13 Name, 14 Name, 15 Name, 16 Name, 17 Name, 18 Name, 19 Name, 20 Name, 21 Name, 22 Name, 23 Name, 24 Name, 25 Name, 26 Name, 27 Name, 28 Name, 29 Name, 30 Name, 31 Name, 32 Name, 33 Name, 34 Name, 35 Name, 36 Name, 37 Name, 38 Name, 39 Name, 40 Name, 41 Name, 42 Name, 43 Name, 44 Name, 45 Name, 46 Name, 47 Name, 48 Name, 49 Name, 50 Name, 51 Name, 52 Name

## XP_54
designator J?  (value not drawn)
Generic 54-contact connector; editable signal names; Pin54_Name: Name; Value: *; Pin53_Name: Name; Pin52_Name: Name; Pin51_Name: Name; Pin50_Name: Name; Pin49_Name: Name; Pin48_Name: Name; Pin47_Name: Name; Pin46_Name: Name; Pin45_Name: Name; Pin44_Name: Name; Pin43_Name: Name; Pin42_Name: Name; Pin41_Name: Name; Pin40_Name: Name; Pin39_Name: Name; Pin38_Name: Name; Pin37_Name: Name; Pin36_Name: Name; Pin35_Name: Name; Pin34_Name: Name; Pin33_Name: Name; Pin32_Name: Name; Pin31_Name: Name; Pin30_Name: Name; Pin29_Name: Name; Pin28_Name: Name; Pin27_Name: Name; Pin26_Name: Name; Pin25_Name: Name; Pin24_Name: Name; Pin23_Name: Name; Pin22_Name: Name; Pin21_Name: Name; Pin20_Name: Name; Pin19_Name: Name; Pin18_Name: Name; Pin17_Name: Name; Pin16_Name: Name; Pin15_Name: Name; Pin14_Name: Name; Pin13_Name: Name; Pin12_Name: Name; Pin11_Name: Name; Pin10_Name: Name; Pin9_Name: Name; Pin8_Name: Name; Pin7_Name: Name; Pin6_Name: Name; Pin5_Name: Name; Pin4_Name: Name; Pin3_Name: Name; Pin2_Name: Name; Pin1_Name: Name
pins: 1 Name, 2 Name, 3 Name, 4 Name, 5 Name, 6 Name, 7 Name, 8 Name, 9 Name, 10 Name, 11 Name, 12 Name, 13 Name, 14 Name, 15 Name, 16 Name, 17 Name, 18 Name, 19 Name, 20 Name, 21 Name, 22 Name, 23 Name, 24 Name, 25 Name, 26 Name, 27 Name, 28 Name, 29 Name, 30 Name, 31 Name, 32 Name, 33 Name, 34 Name, 35 Name, 36 Name, 37 Name, 38 Name, 39 Name, 40 Name, 41 Name, 42 Name, 43 Name, 44 Name, 45 Name, 46 Name, 47 Name, 48 Name, 49 Name, 50 Name, 51 Name, 52 Name, 53 Name, 54 Name

## XP_56
designator J?  (value not drawn)
Generic 56-contact connector; editable signal names; Pin56_Name: Name; Value: *; Pin55_Name: Name; Pin54_Name: Name; Pin53_Name: Name; Pin52_Name: Name; Pin51_Name: Name; Pin50_Name: Name; Pin49_Name: Name; Pin48_Name: Name; Pin47_Name: Name; Pin46_Name: Name; Pin45_Name: Name; Pin44_Name: Name; Pin43_Name: Name; Pin42_Name: Name; Pin41_Name: Name; Pin40_Name: Name; Pin39_Name: Name; Pin38_Name: Name; Pin37_Name: Name; Pin36_Name: Name; Pin35_Name: Name; Pin34_Name: Name; Pin33_Name: Name; Pin32_Name: Name; Pin31_Name: Name; Pin30_Name: Name; Pin29_Name: Name; Pin28_Name: Name; Pin27_Name: Name; Pin26_Name: Name; Pin25_Name: Name; Pin24_Name: Name; Pin23_Name: Name; Pin22_Name: Name; Pin21_Name: Name; Pin20_Name: Name; Pin19_Name: Name; Pin18_Name: Name; Pin17_Name: Name; Pin16_Name: Name; Pin15_Name: Name; Pin14_Name: Name; Pin13_Name: Name; Pin12_Name: Name; Pin11_Name: Name; Pin10_Name: Name; Pin9_Name: Name; Pin8_Name: Name; Pin7_Name: Name; Pin6_Name: Name; Pin5_Name: Name; Pin4_Name: Name; Pin3_Name: Name; Pin2_Name: Name; Pin1_Name: Name
pins: 1 Name, 2 Name, 3 Name, 4 Name, 5 Name, 6 Name, 7 Name, 8 Name, 9 Name, 10 Name, 11 Name, 12 Name, 13 Name, 14 Name, 15 Name, 16 Name, 17 Name, 18 Name, 19 Name, 20 Name, 21 Name, 22 Name, 23 Name, 24 Name, 25 Name, 26 Name, 27 Name, 28 Name, 29 Name, 30 Name, 31 Name, 32 Name, 33 Name, 34 Name, 35 Name, 36 Name, 37 Name, 38 Name, 39 Name, 40 Name, 41 Name, 42 Name, 43 Name, 44 Name, 45 Name, 46 Name, 47 Name, 48 Name, 49 Name, 50 Name, 51 Name, 52 Name, 53 Name, 54 Name, 55 Name, 56 Name

## XP_58
designator J?  (value not drawn)
Generic 58-contact connector; editable signal names; Pin58_Name: Name; Value: *; Pin57_Name: Name; Pin56_Name: Name; Pin55_Name: Name; Pin54_Name: Name; Pin53_Name: Name; Pin52_Name: Name; Pin51_Name: Name; Pin50_Name: Name; Pin49_Name: Name; Pin48_Name: Name; Pin47_Name: Name; Pin46_Name: Name; Pin45_Name: Name; Pin44_Name: Name; Pin43_Name: Name; Pin42_Name: Name; Pin41_Name: Name; Pin40_Name: Name; Pin39_Name: Name; Pin38_Name: Name; Pin37_Name: Name; Pin36_Name: Name; Pin35_Name: Name; Pin34_Name: Name; Pin33_Name: Name; Pin32_Name: Name; Pin31_Name: Name; Pin30_Name: Name; Pin29_Name: Name; Pin28_Name: Name; Pin27_Name: Name; Pin26_Name: Name; Pin25_Name: Name; Pin24_Name: Name; Pin23_Name: Name; Pin22_Name: Name; Pin21_Name: Name; Pin20_Name: Name; Pin19_Name: Name; Pin18_Name: Name; Pin17_Name: Name; Pin16_Name: Name; Pin15_Name: Name; Pin14_Name: Name; Pin13_Name: Name; Pin12_Name: Name; Pin11_Name: Name; Pin10_Name: Name; Pin9_Name: Name; Pin8_Name: Name; Pin7_Name: Name; Pin6_Name: Name; Pin5_Name: Name; Pin4_Name: Name; Pin3_Name: Name; Pin2_Name: Name; Pin1_Name: Name
pins: 1 Name, 2 Name, 3 Name, 4 Name, 5 Name, 6 Name, 7 Name, 8 Name, 9 Name, 10 Name, 11 Name, 12 Name, 13 Name, 14 Name, 15 Name, 16 Name, 17 Name, 18 Name, 19 Name, 20 Name, 21 Name, 22 Name, 23 Name, 24 Name, 25 Name, 26 Name, 27 Name, 28 Name, 29 Name, 30 Name, 31 Name, 32 Name, 33 Name, 34 Name, 35 Name, 36 Name, 37 Name, 38 Name, 39 Name, 40 Name, 41 Name, 42 Name, 43 Name, 44 Name, 45 Name, 46 Name, 47 Name, 48 Name, 49 Name, 50 Name, 51 Name, 52 Name, 53 Name, 54 Name, 55 Name, 56 Name, 57 Name, 58 Name

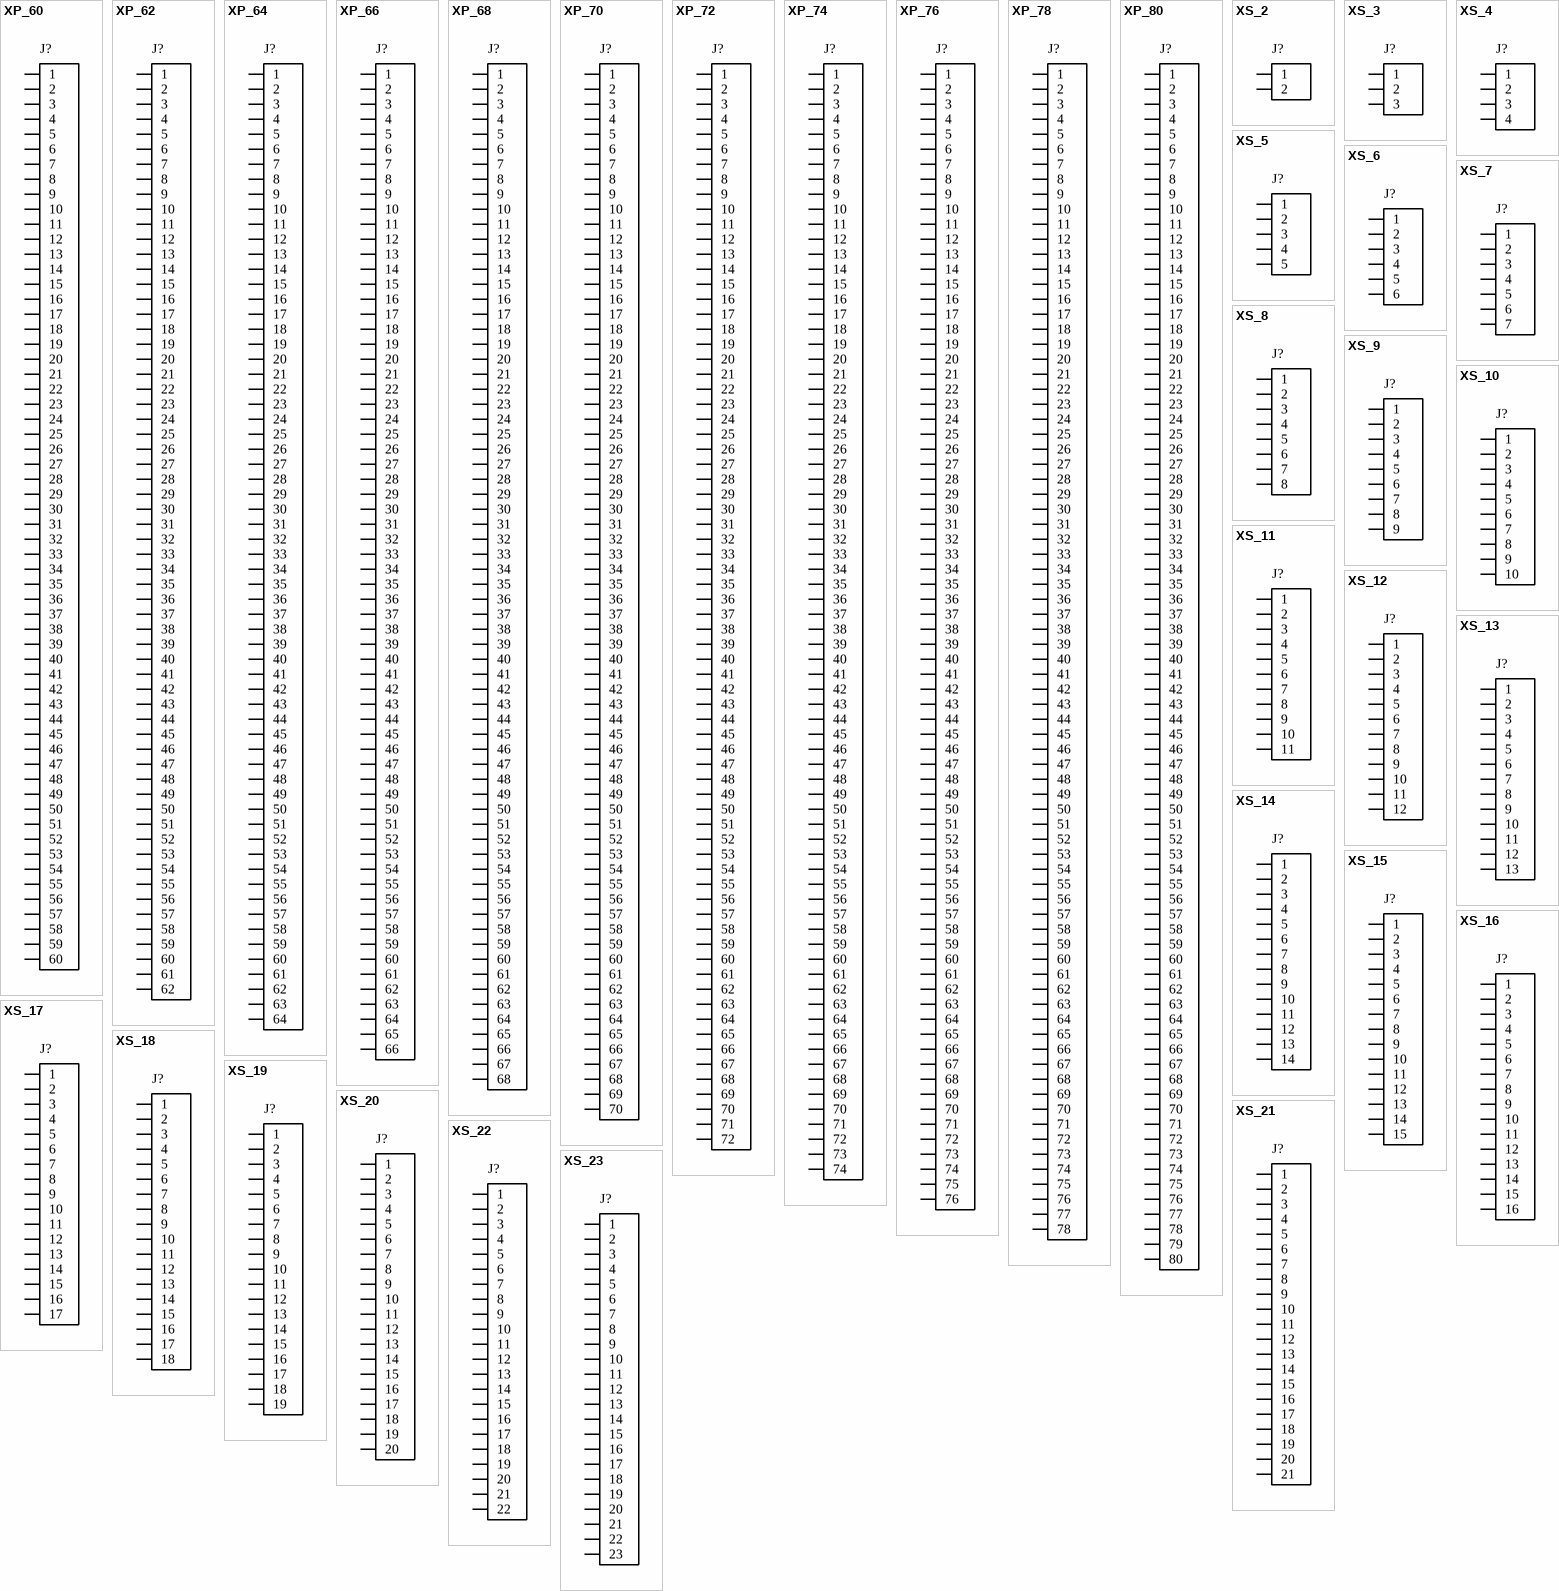
[diagram p2: symbols XP_60 to XS_23]

## XP_60
designator J?  (value not drawn)
Generic 60-contact connector; editable signal names; Pin60_Name: Name; Value: *; Pin59_Name: Name; Pin58_Name: Name; Pin57_Name: Name; Pin56_Name: Name; Pin55_Name: Name; Pin54_Name: Name; Pin53_Name: Name; Pin52_Name: Name; Pin51_Name: Name; Pin50_Name: Name; Pin49_Name: Name; Pin48_Name: Name; Pin47_Name: Name; Pin46_Name: Name; Pin45_Name: Name; Pin44_Name: Name; Pin43_Name: Name; Pin42_Name: Name; Pin41_Name: Name; Pin40_Name: Name; Pin39_Name: Name; Pin38_Name: Name; Pin37_Name: Name; Pin36_Name: Name; Pin35_Name: Name; Pin34_Name: Name; Pin33_Name: Name; Pin32_Name: Name; Pin31_Name: Name; Pin30_Name: Name; Pin29_Name: Name; Pin28_Name: Name; Pin27_Name: Name; Pin26_Name: Name; Pin25_Name: Name; Pin24_Name: Name; Pin23_Name: Name; Pin22_Name: Name; Pin21_Name: Name; Pin20_Name: Name; Pin19_Name: Name; Pin18_Name: Name; Pin17_Name: Name; Pin16_Name: Name; Pin15_Name: Name; Pin14_Name: Name; Pin13_Name: Name; Pin12_Name: Name; Pin11_Name: Name; Pin10_Name: Name; Pin9_Name: Name; Pin8_Name: Name; Pin7_Name: Name; Pin6_Name: Name; Pin5_Name: Name; Pin4_Name: Name; Pin3_Name: Name; Pin2_Name: Name; Pin1_Name: Name
pins: 1 Name, 2 Name, 3 Name, 4 Name, 5 Name, 6 Name, 7 Name, 8 Name, 9 Name, 10 Name, 11 Name, 12 Name, 13 Name, 14 Name, 15 Name, 16 Name, 17 Name, 18 Name, 19 Name, 20 Name, 21 Name, 22 Name, 23 Name, 24 Name, 25 Name, 26 Name, 27 Name, 28 Name, 29 Name, 30 Name, 31 Name, 32 Name, 33 Name, 34 Name, 35 Name, 36 Name, 37 Name, 38 Name, 39 Name, 40 Name, 41 Name, 42 Name, 43 Name, 44 Name, 45 Name, 46 Name, 47 Name, 48 Name, 49 Name, 50 Name, 51 Name, 52 Name, 53 Name, 54 Name, 55 Name, 56 Name, 57 Name, 58 Name, 59 Name, 60 Name

## XP_62
designator J?  (value not drawn)
Generic 62-contact connector; editable signal names; Pin62_Name: Name; Value: *; Pin61_Name: Name; Pin60_Name: Name; Pin59_Name: Name; Pin58_Name: Name; Pin57_Name: Name; Pin56_Name: Name; Pin55_Name: Name; Pin54_Name: Name; Pin53_Name: Name; Pin52_Name: Name; Pin51_Name: Name; Pin50_Name: Name; Pin49_Name: Name; Pin48_Name: Name; Pin47_Name: Name; Pin46_Name: Name; Pin45_Name: Name; Pin44_Name: Name; Pin43_Name: Name; Pin42_Name: Name; Pin41_Name: Name; Pin40_Name: Name; Pin39_Name: Name; Pin38_Name: Name; Pin37_Name: Name; Pin36_Name: Name; Pin35_Name: Name; Pin34_Name: Name; Pin33_Name: Name; Pin32_Name: Name; Pin31_Name: Name; Pin30_Name: Name; Pin29_Name: Name; Pin28_Name: Name; Pin27_Name: Name; Pin26_Name: Name; Pin25_Name: Name; Pin24_Name: Name; Pin23_Name: Name; Pin22_Name: Name; Pin21_Name: Name; Pin20_Name: Name; Pin19_Name: Name; Pin18_Name: Name; Pin17_Name: Name; Pin16_Name: Name; Pin15_Name: Name; Pin14_Name: Name; Pin13_Name: Name; Pin12_Name: Name; Pin11_Name: Name; Pin10_Name: Name; Pin9_Name: Name; Pin8_Name: Name; Pin7_Name: Name; Pin6_Name: Name; Pin5_Name: Name; Pin4_Name: Name; Pin3_Name: Name; Pin2_Name: Name; Pin1_Name: Name
pins: 1 Name, 2 Name, 3 Name, 4 Name, 5 Name, 6 Name, 7 Name, 8 Name, 9 Name, 10 Name, 11 Name, 12 Name, 13 Name, 14 Name, 15 Name, 16 Name, 17 Name, 18 Name, 19 Name, 20 Name, 21 Name, 22 Name, 23 Name, 24 Name, 25 Name, 26 Name, 27 Name, 28 Name, 29 Name, 30 Name, 31 Name, 32 Name, 33 Name, 34 Name, 35 Name, 36 Name, 37 Name, 38 Name, 39 Name, 40 Name, 41 Name, 42 Name, 43 Name, 44 Name, 45 Name, 46 Name, 47 Name, 48 Name, 49 Name, 50 Name, 51 Name, 52 Name, 53 Name, 54 Name, 55 Name, 56 Name, 57 Name, 58 Name, 59 Name, 60 Name, 61 Name, 62 Name